# Altium integrated library CRCW040233R0JNEE.IntLib: 1 symbol
Pins are listed as number, name and electrical type; pins without a type are passive.

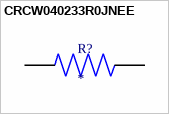
[diagram p0: symbol CRCW040233R0JNEE]

## CRCW040233R0JNEE
designator R?
MP: CRCW040233R0JNEE; Package: None; Price: None; Value: *; Availability: Unavailable
footprint RESC1005X40N
pins: 1, 2